# Altium schematic symbol library MMDT3906DW.SchLib: 1 symbol
Pins are listed as number, name and electrical type; pins without a type are passive.

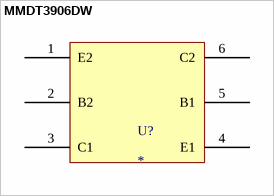
[diagram p0: symbol MMDT3906DW]

## MMDT3906DW
designator U?
Bipolar (BJT) Transistor PNP 40 V 0.2 A 250MHz 200 mW Surface Mount SOT-363
footprint SOT65P230X120-6N
pins: 1 E2, 2 B2, 3 C1, 4 E1, 5 B1, 6 C2